# Altium footprint library Capacitors.PcbLib: 59 footprints (part 3 of 4)
Each footprint in its own frame and in the unit in brackets; x right, y up, seen from the top. Pads: shape width x height; smd on the part's side, far side on the other; paste and mask are expansions set on the pad; w line width, h text height; cw(c..) or ccw(c..) is an arc to the next point about the centre after c.
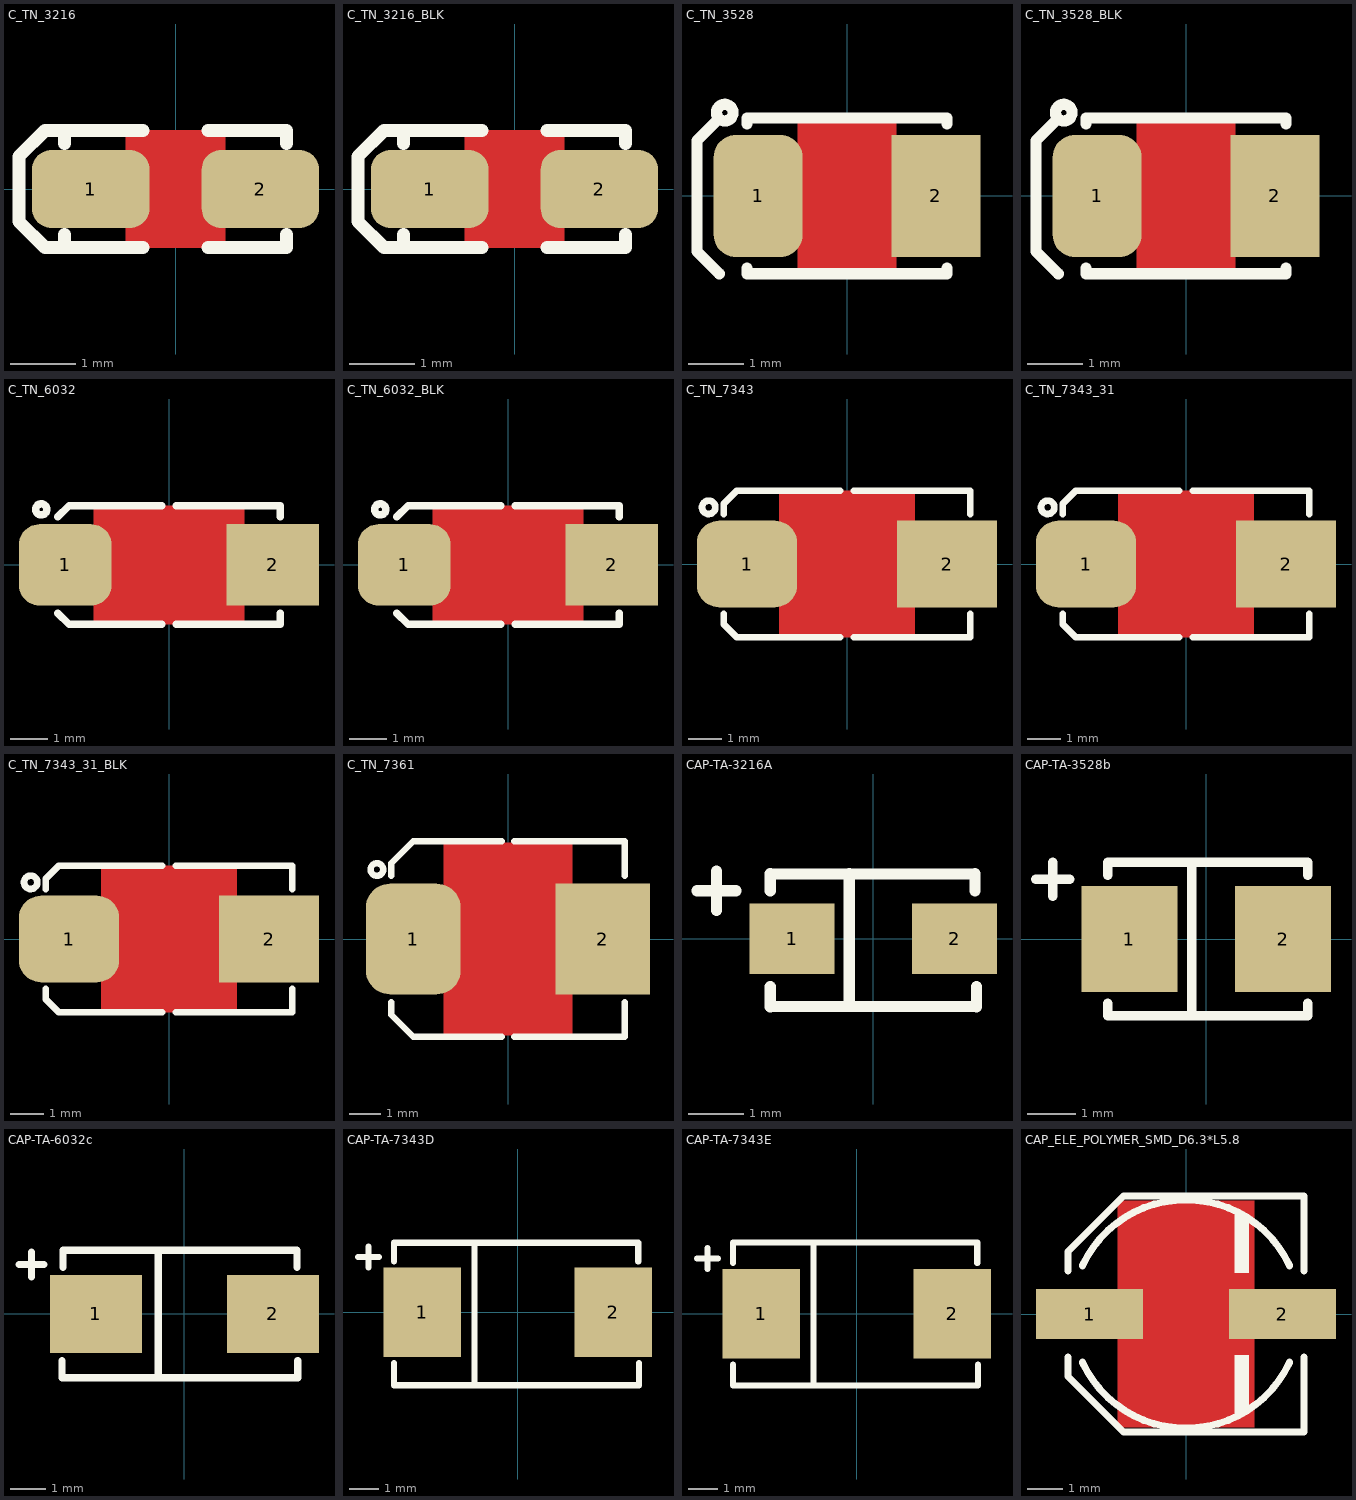
[diagram p2: the footprints below, top view; thin cyan lines are the x and y axes]

## C_TN_3216 [mm] "CAPACITOR, TAN A, 1206P, 3.2x1.6mm"
height 1.8
pads (2):
  rrect50% 1.8x1.2 smd paste-0.118 mask+0.075: 1(-1.3,0) 2(1.3,0)
Top Layer:
  pour cut-out: -0.762,0.9 0.762,0.9 0.762,-0.9 -0.762,-0.9
Top Overlay:
  lines w0.2: -1.7,-0.7 -1.7,-0.9 ; -1.7,0.7 -1.7,0.9 ; -0.5,-0.9 -1.7,-0.9 ; -0.5,0.9 -1.7,0.9 ; 0.5,-0.9 1.7,-0.9 1.7,-0.7 ; 0.5,0.9 1.7,0.9 1.7,0.7 ; -1.7,-0.9 -2,-0.9 -2.4,-0.5 -2.4,0.5 -2,0.9 -1.7,0.9
3D body "User Library-CAP_TANT_3216-18_A_case-1.step": height 1.7, standoff 0, extent -1.7,-0.9 1.7,0.9

## C_TN_3216_BLK [mm] "CAPACITOR, TAN A, 3.2x1.6mm, BLACK"
height 1.8
pads (2):
  rrect50% 1.8x1.2 smd paste-0.118 mask+0.075: 1(-1.3,0) 2(1.3,0)
Top Layer:
  pour cut-out: -0.762,0.9 0.762,0.9 0.762,-0.9 -0.762,-0.9
Top Overlay:
  lines w0.2: -1.7,-0.7 -1.7,-0.9 ; -1.7,0.7 -1.7,0.9 ; -0.5,-0.9 -1.7,-0.9 ; -0.5,0.9 -1.7,0.9 ; 0.5,-0.9 1.7,-0.9 1.7,-0.7 ; 0.5,0.9 1.7,0.9 1.7,0.7 ; -1.7,-0.9 -2,-0.9 -2.4,-0.5 -2.4,0.5 -2,0.9 -1.7,0.9
3D body "CAPM-TANTA-BK.stp": height 1.8, standoff 0, extent -1.7,-0.9 1.7,0.9

## C_TN_3528 [mm] "CAPACITOR, TAN B, TAN H, TAN T, TAN M, 3528P, 1210P, 3.5X2.8mm"
pads (2):
  rrect50% 1.6x2.2 smd paste-0.152 mask+0.1: 1(-1.6,0)
  rect 1.6x2.2 smd paste-0.151 mask+0.1: 2(1.6,0)
Top Layer:
  pour cut-out: -0.889,1.4 -0.889,-1.4 0.889,-1.4 0.889,1.4
Top Overlay:
  circle w0.2: c-2.2,1.5 r0.15
  lines w0.2: -2.35,1.35 -2.7,1 -2.7,-1 -2.3,-1.4 ; -1.8,-1.3 -1.8,-1.4 1.8,-1.4 1.8,-1.3 ; -1.8,1.3 -1.8,1.4 1.8,1.4 1.8,1.3
3D body "User Library-AVX_BCASE.step": height 2.03, standoff 0, extent -1.85,-1.465 1.85,1.465

## C_TN_3528_BLK [mm] "CAPACITOR, TAN B, 3.5X2.8mm, BLACK"
pads (2):
  rrect50% 1.6x2.2 smd paste-0.152 mask+0.1: 1(-1.6,0)
  rect 1.6x2.2 smd paste-0.151 mask+0.1: 2(1.6,0)
Top Layer:
  pour cut-out: -0.889,1.4 -0.889,-1.4 0.889,-1.4 0.889,1.4
Top Overlay:
  circle w0.2: c-2.2,1.5 r0.15
  lines w0.2: -2.35,1.35 -2.7,1 -2.7,-1 -2.3,-1.4 ; -1.8,-1.3 -1.8,-1.4 1.8,-1.4 1.8,-1.3 ; -1.8,1.3 -1.8,1.4 1.8,1.4 1.8,1.3
3D body "CAPM-TANTB-BK.stp": height 2.1, standoff 0, extent -1.85,-1.5 1.85,1.5

## C_TN_6032 [mm] "CAPACITOR, TAN C, TAN F, TAN U, TAN L, 6032P, 6.0X3.2mm"
height 2.8
pads (2):
  rrect50% 2.5x2.2 smd: 1(-2.8,0)
  rect 2.5x2.2 smd: 2(2.8,0)
Top Layer:
  pour cut-out: -2.032,1.6 2.032,1.6 2.032,-1.6 -2.032,-1.6
Top Overlay:
  circle w0.2: c-3.45,1.5 r0.15
  lines w0.2: -3,-1.3 -2.7,-1.6 -0.2,-1.6 ; -3,1.3 -2.7,1.6 -0.2,1.6 ; 0.2,-1.6 3,-1.6 3,-1.3 ; 0.2,1.6 3,1.6 3,1.3
3D body "User Library-CAP_TANT_6032-28_y.step": height 2.8, standoff 0, extent -3.15,-1.75 3.15,1.75

## C_TN_6032_BLK [mm] "CAPACITOR, TAN C, 6.0X3.2mm, BLACK"
pads (2):
  rrect50% 2.5x2.2 smd: 1(-2.8,0)
  rect 2.5x2.2 smd: 2(2.8,0)
Top Layer:
  pour cut-out: -2.032,1.6 2.032,1.6 2.032,-1.6 -2.032,-1.6
Top Overlay:
  circle w0.2: c-3.45,1.5 r0.15
  lines w0.2: -3,-1.3 -2.7,-1.6 -0.2,-1.6 ; -3,1.3 -2.7,1.6 -0.2,1.6 ; 0.2,-1.6 3,-1.6 3,-1.3 ; 0.2,1.6 3,1.6 3,1.3
3D body "CAPM-TANTC-BK.stp": height 2.7, standoff 0, extent -3.1,-1.7 3.1,1.7

## C_TN_7343 [mm] "CAPACITOR, TAN D, TAN E, TAN Y, TAN X, 7343P, 7.3X4.3mm"
height 4.3
pads (2):
  rrect50% 3x2.6 smd: 1(-3,0)
  rect 3x2.6 smd: 2(3,0)
Top Layer:
  pour cut-out: -2.032,2.2 -2.032,-2.2 2.032,-2.2 2.032,2.2
Top Overlay:
  circle w0.2: c-4.15,1.7 r0.2
  lines w0.2: -3.7,-1.5 -3.7,-1.8 -3.3,-2.2 -0.2,-2.2 ; -3.7,1.5 -3.7,1.8 -3.3,2.2 -0.2,2.2 ; 0.2,-2.2 3.7,-2.2 3.7,-1.5 ; 0.2,2.2 3.7,2.2 3.7,1.5
3D body "User Library-AVX_E_CASE.step": height 4.2, standoff 0, extent -3.7,-2.225 3.701,2.225

## C_TN_7343_31 [mm] "CAPACITOR, TAN D, TAN E, TAN Y, TAN X, 7343P, 7.3X4.3mm"
height 3.1
pads (2):
  rrect50% 3x2.6 smd: 1(-3,0)
  rect 3x2.6 smd: 2(3,0)
Top Layer:
  pour cut-out: -2.032,2.2 -2.032,-2.2 2.032,-2.2 2.032,2.2
Top Overlay:
  circle w0.2: c-4.15,1.7 r0.2
  lines w0.2: -3.7,-1.5 -3.7,-1.8 -3.3,-2.2 -0.2,-2.2 ; -3.7,1.5 -3.7,1.8 -3.3,2.2 -0.2,2.2 ; 0.2,-2.2 3.7,-2.2 3.7,-1.5 ; 0.2,2.2 3.7,2.2 3.7,1.5
3D body "SW3dPS-cap_d.STEP": height 2.81, standoff 0, extent -3.647,-2.15 3.647,2.15

## C_TN_7343_31_BLK [mm] "CAPACITOR, TAN D, 7.3X4.3mm, BLACK"
height 3.1
pads (2):
  rrect50% 3x2.6 smd: 1(-3,0)
  rect 3x2.6 smd: 2(3,0)
Top Layer:
  pour cut-out: -2.032,2.2 -2.032,-2.2 2.032,-2.2 2.032,2.2
Top Overlay:
  circle w0.2: c-4.15,1.7 r0.2
  lines w0.2: -3.7,-1.5 -3.7,-1.8 -3.3,-2.2 -0.2,-2.2 ; -3.7,1.5 -3.7,1.8 -3.3,2.2 -0.2,2.2 ; 0.2,-2.2 3.7,-2.2 3.7,-1.5 ; 0.2,2.2 3.7,2.2 3.7,1.5
3D body "CAPM-TANTN-BK.stp": height 3, standoff 0, extent -3.75,-2.25 3.75,2.25

## C_TN_7361 [mm] "CAPACITOR, TAN V, 2924, 7361, 7.3X6.1mm"
pads (2):
  rrect50% 3x3.5 smd: 1(-3,0)
  rect 3x3.5 smd: 2(3,0)
Top Layer:
  pour cut-out: -2.032,3.048 -2.032,-3.048 2.032,-3.048 2.032,3.048
Top Overlay:
  circle w0.2: c-4.15,2.2 r0.2
  lines w0.2: -3.7,-2 -3.7,-2.4 -3,-3.1 -0.2,-3.1 ; -3.7,2 -3.7,2.4 -3,3.1 -0.2,3.1 ; 0.2,-3.1 3.7,-3.1 3.7,-2 ; 0.2,3.1 3.7,3.1 3.7,2
3D body "User Library-CT_V.step": height 3.45, standoff 0, extent -3.65,-3.05 3.65,3.05

## CAP-TA-3216A [mil]
pads (2):
  rect 60x50 smd: 1(-57.5,0) 2(57.5,0)
Top Overlay:
  lines w7.87: -73,-48 27.5,-48 73,-48 ; -73,46 23.5,46 72,46
  lines w8: -124.78,34 -111,34 ; -111,20.22 -111,34 ; -111,47.78 -111,34 ; -97.22,34 -111,34 ; -73,-48 -73,-34 ; -73,34 -73,46 ; -17,-45 -17,46 ; 72,34 72,46 ; 73,-48 73,-34
3D body "User Library-AVX_ACASE.step": height 67.32, standoff 0, extent -66.92,-34.07 66.94,32.08

## CAP-TA-3528b [mm]
pads (2):
  rect 2x2.2 smd: 1(-1.6,0) 2(1.6,0)
Top Overlay:
  lines w0.203: -3.547,1.244 -3.197,1.244 ; -3.197,0.894 -3.197,1.244 ; -3.197,1.594 -3.197,1.244 ; -2.847,1.244 -3.197,1.244 ; -2.054,-1.337 -2.054,-1.6 2.112,-1.6 2.112,-1.337 ; -2.054,1.33 -2.054,1.6 2.112,1.6 ; -0.305,-1.565 -0.305,1.559 ; 2.112,1.33 2.112,1.584
3D body "User Library-AVX_BCASE.step": height 2.03, standoff 0, extent -1.825,-1.465 1.876,1.465

## CAP-TA-6032c [mm]
pads (2):
  rect 2.6x2.2 smd: 1(-2.5,0) 2(2.5,0)
Top Overlay:
  lines w0.203: -4.668,1.397 -4.318,1.397 ; -4.318,1.047 -4.318,1.397 ; -4.318,1.747 -4.318,1.397 ; -3.968,1.397 -4.318,1.397 ; -3.454,-1.321 -3.454,-1.8 3.2,-1.8 3.2,-1.321 ; -3.429,1.321 -3.429,1.8 3.175,1.8 3.175,1.321 ; -0.737,-1.802 -0.737,1.698
3D body "User Library-AVX_C_CASE.step": height 2.7, standoff 0, extent -3.202,-1.675 2.898,1.675

## CAP-TA-7343D [mm]
pads (2):
  rect 2.6x3 smd: 1(-3.2,0) 2(3.2,0)
Top Overlay:
  lines w0.203: -5.354,1.854 -5.004,1.854 ; -5.004,1.504 -5.004,1.854 ; -5.004,2.204 -5.004,1.854 ; -4.654,1.854 -5.004,1.854 ; -4.14,-1.702 -4.14,-2.438 4.064,-2.438 4.064,-1.702 ; -4.14,1.702 -4.14,2.337 4.039,2.337 4.039,1.702 ; -1.448,-2.413 -1.448,2.286
3D body "User Library-AVX_D_CASE.step": height 3.01, standoff 0, extent -3.725,-2.276 3.675,2.174

## CAP-TA-7343E [mm]
pads (2):
  rect 2.6x3 smd: 1(-3.2,0) 2(3.2,0)
Top Overlay:
  lines w0.203: -5.354,1.854 -5.004,1.854 ; -5.004,1.504 -5.004,1.854 ; -5.004,2.204 -5.004,1.854 ; -4.654,1.854 -5.004,1.854 ; -4.14,-1.702 -4.14,-2.413 4.064,-2.413 4.064,-1.702 ; -4.14,1.702 -4.14,2.388 4.039,2.388 4.039,1.702 ; -1.448,-2.388 -1.448,2.311
3D body "User Library-AVX_E_CASE.step": height 4.2, standoff 0, extent -3.725,-2.225 3.676,2.225

## CAP_ELE_POLYMER_SMD_D6.3*L5.8 [mm] "Electrolytic Cap, D: 6.3mm L: 5.8mm, Size D"
height 5.8
pads (2):
  rect 3x1.4 smd paste-0.154: 1(-2.7,0) 2(2.7,0)
Top Layer:
  pour cut-out: 1.905,3.175 1.905,-3.175 -1.905,-3.175 -1.905,3.175
Top Overlay:
  rectangle: 1.36,-2.8 1.76,-1.143
  rectangle: 1.36,1.143 1.76,2.8
  lines w0.2: -3.3,-1.2 -3.3,-1.75 -1.75,-3.3 3.3,-3.3 3.3,-1.2 ; -3.3,1.2 -3.3,1.75 -1.75,3.3 3.3,3.3 3.3,1.2 ; -2.9,-1.352 ccw(c0,0) 2.9,-1.352 ; -2.9,1.352 cw(c0,0) 2.9,1.352
3D body "6.3x5.8x2.2.stp": height 5.8, standoff 0, extent -3.65,-3.3 3.65,3.3